# Altium schematic symbol library MY_LIB_Semiconductors.SchLib: 50 symbols
Pins are listed as number, name and electrical type; pins without a type are passive.

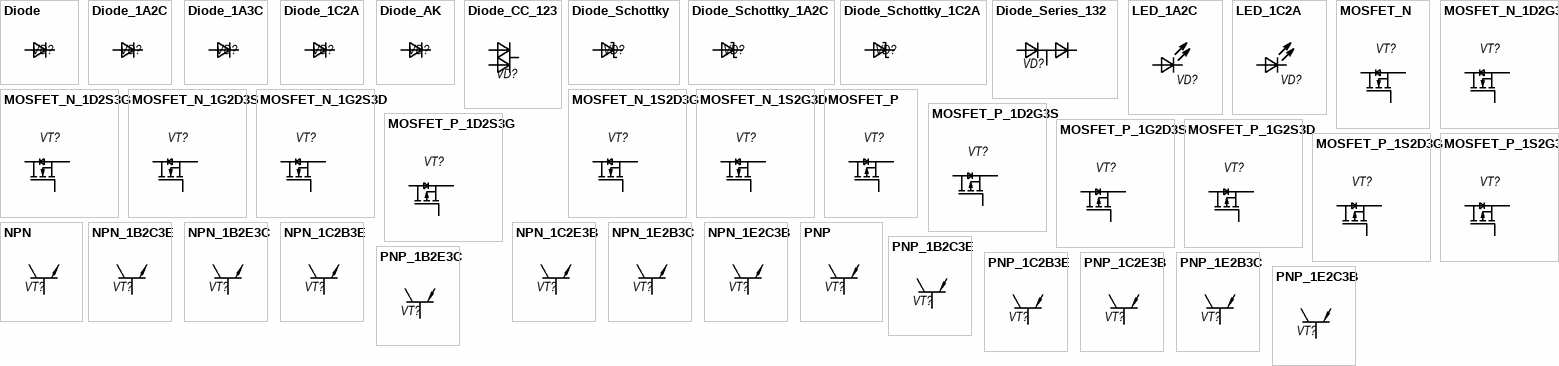
[diagram p0: symbols Diode to PNP_1E2C3B]

## Diode
designator VD?  (value not drawn)
Generic Diode; manually redrawn to DBUR default-view dimensions; horizontal
pins: 1 A, 2 C

## Diode_1A2C
designator VD?  (value not drawn)
Generic Diode; pin mapping 1A2C; geometry preserved from Diode
pins: 1 A, 2 C

## Diode_1A3C
designator VD?  (value not drawn)
Diode; part1: A=1,C=3
pins: 1 A, 3 C

## Diode_1C2A
designator VD?  (value not drawn)
Generic Diode; pin mapping 1C2A; geometry preserved from Diode
pins: 1 C, 2 A

## Diode_AK
designator VD?  (value not drawn)
Diode; part1: A=A,C=K
pins: A, K C

## Diode_CC_123
designator VD?  (value not drawn)
Two Diode junctions; compact touching contours per GOST 2.730-73 table 5 items 8/8a; CC; pins 1,2,3
pins: 1 A1, 2 A2, 3 C

## Diode_Schottky
designator VD?  (value not drawn)
Generic Diode_Schottky; manually redrawn to DBUR default-view dimensions; horizontal
pins: 1 A, 2 C

## Diode_Schottky_1A2C
designator VD?  (value not drawn)
Generic Diode_Schottky; pin mapping 1A2C; geometry preserved from Diode_Schottky
pins: 1 A, 2 C

## Diode_Schottky_1C2A
designator VD?  (value not drawn)
Generic Diode_Schottky; pin mapping 1C2A; geometry preserved from Diode_Schottky
pins: 1 C, 2 A

## Diode_Series_132
designator VD?  (value not drawn)
Diode; two junctions in one symbol; SERIES; physical pins 1,2,3
pins: 1 A1, 2 C2, 3 C1/A2

## LED_1A2C
designator VD?, comment LED  (value not drawn)
Generic LED; manually redrawn to DBUR default-view dimensions; horizontal
pins: 1 A, 2 C

## LED_1C2A
designator VD?, comment LED  (value not drawn)
Generic LED; manually redrawn to DBUR default-view dimensions; horizontal
pins: 1 C, 2 A

## MOSFET_N
designator VT?  (value not drawn)
Generic MOSFET_N; manually redrawn to DBUR default-view dimensions; horizontal
pins: 1 Gate, 2 Drain, 3 Source

## MOSFET_N_1D2G3S
designator VT?  (value not drawn)
Generic MOSFET_N; pin mapping 1D2G3S; geometry preserved from MOSFET_N
pins: 1 Drain, 2 Gate, 3 Source

## MOSFET_N_1D2S3G
designator VT?  (value not drawn)
Generic MOSFET_N; pin mapping 1D2S3G; geometry preserved from MOSFET_N
pins: 1 Drain, 2 Source, 3 Gate

## MOSFET_N_1G2D3S
designator VT?  (value not drawn)
Generic MOSFET_N; pin mapping 1G2D3S; geometry preserved from MOSFET_N
pins: 1 Gate, 2 Drain, 3 Source

## MOSFET_N_1G2S3D
designator VT?  (value not drawn)
Generic MOSFET_N; pin mapping 1G2S3D; geometry preserved from MOSFET_N
pins: 1 Gate, 2 Source, 3 Drain

## MOSFET_N_1S2D3G
designator VT?  (value not drawn)
Generic MOSFET_N; pin mapping 1S2D3G; geometry preserved from MOSFET_N
pins: 1 Source, 2 Drain, 3 Gate

## MOSFET_N_1S2G3D
designator VT?  (value not drawn)
Generic MOSFET_N; pin mapping 1S2G3D; geometry preserved from MOSFET_N
pins: 1 Source, 2 Gate, 3 Drain

## MOSFET_P
designator VT?  (value not drawn)
Generic MOSFET_P; manually redrawn to DBUR default-view dimensions; horizontal
pins: 1 GATE, 2 DRAIN, 3 SOURCE

## MOSFET_P_1D2G3S
designator VT?  (value not drawn)
Generic MOSFET_P; pin mapping 1D2G3S; geometry preserved from MOSFET_P
pins: 1 DRAIN, 2 GATE, 3 SOURCE

## MOSFET_P_1D2S3G
designator VT?  (value not drawn)
Generic MOSFET_P; pin mapping 1D2S3G; geometry preserved from MOSFET_P
pins: 1 DRAIN, 2 SOURCE, 3 GATE

## MOSFET_P_1G2D3S
designator VT?  (value not drawn)
Generic MOSFET_P; pin mapping 1G2D3S; geometry preserved from MOSFET_P
pins: 1 GATE, 2 DRAIN, 3 SOURCE

## MOSFET_P_1G2S3D
designator VT?  (value not drawn)
Generic MOSFET_P; pin mapping 1G2S3D; geometry preserved from MOSFET_P
pins: 1 GATE, 2 SOURCE, 3 DRAIN

## MOSFET_P_1S2D3G
designator VT?  (value not drawn)
Generic MOSFET_P; pin mapping 1S2D3G; geometry preserved from MOSFET_P
pins: 1 SOURCE, 2 DRAIN, 3 GATE

## MOSFET_P_1S2G3D
designator VT?  (value not drawn)
Generic MOSFET_P; pin mapping 1S2G3D; geometry preserved from MOSFET_P
pins: 1 SOURCE, 2 GATE, 3 DRAIN

## NPN
designator VT?  (value not drawn)
Generic NPN; manually redrawn to DBUR default-view dimensions; horizontal
pins: 1 Base, 2 EMITTER, 3 COLLECTOR

## NPN_1B2C3E
designator VT?  (value not drawn)
Generic NPN; pin mapping 1B2C3E; geometry preserved from NPN
pins: 1 Base, 2 COLLECTOR, 3 EMITTER

## NPN_1B2E3C
designator VT?  (value not drawn)
Generic NPN; pin mapping 1B2E3C; geometry preserved from NPN
pins: 1 Base, 2 EMITTER, 3 COLLECTOR

## NPN_1C2B3E
designator VT?  (value not drawn)
Generic NPN; pin mapping 1C2B3E; geometry preserved from NPN
pins: 1 COLLECTOR, 2 Base, 3 EMITTER

## NPN_1C2E3B
designator VT?  (value not drawn)
Generic NPN; pin mapping 1C2E3B; geometry preserved from NPN
pins: 1 COLLECTOR, 2 EMITTER, 3 Base

## NPN_1E2B3C
designator VT?  (value not drawn)
Generic NPN; pin mapping 1E2B3C; geometry preserved from NPN
pins: 1 EMITTER, 2 Base, 3 COLLECTOR

## NPN_1E2C3B
designator VT?  (value not drawn)
Generic NPN; pin mapping 1E2C3B; geometry preserved from NPN
pins: 1 EMITTER, 2 COLLECTOR, 3 Base

## PNP
designator VT?  (value not drawn)
Generic PNP; manually redrawn to DBUR default-view dimensions; horizontal
pins: 1 База, 2 Эмиттер, 3 Коллектор

## PNP_1B2C3E
designator VT?  (value not drawn)
Generic PNP; pin mapping 1B2C3E; geometry preserved from PNP
pins: 1 База, 2 Коллектор, 3 Эмиттер

## PNP_1B2E3C
designator VT?  (value not drawn)
Generic PNP; pin mapping 1B2E3C; geometry preserved from PNP
pins: 1 База, 2 Эмиттер, 3 Коллектор

## PNP_1C2B3E
designator VT?  (value not drawn)
Generic PNP; pin mapping 1C2B3E; geometry preserved from PNP
pins: 1 Коллектор, 2 База, 3 Эмиттер

## PNP_1C2E3B
designator VT?  (value not drawn)
Generic PNP; pin mapping 1C2E3B; geometry preserved from PNP
pins: 1 Коллектор, 2 Эмиттер, 3 База

## PNP_1E2B3C
designator VT?  (value not drawn)
Generic PNP; pin mapping 1E2B3C; geometry preserved from PNP
pins: 1 Эмиттер, 2 База, 3 Коллектор

## PNP_1E2C3B
designator VT?  (value not drawn)
Generic PNP; pin mapping 1E2C3B; geometry preserved from PNP
pins: 1 Эмиттер, 2 Коллектор, 3 База

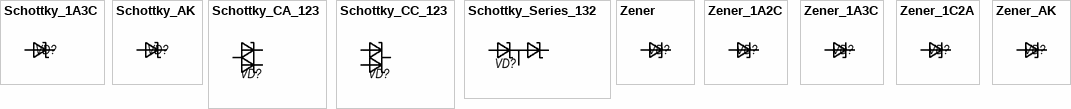
[diagram p1: symbols Schottky_1A3C to Zener_AK]

## Schottky_1A3C
designator VD?  (value not drawn)
Diode_Schottky; part1: A=1,C=3
pins: 1 A, 3 C

## Schottky_AK
designator VD?  (value not drawn)
Diode_Schottky; part1: A=A,C=K
pins: A, K C

## Schottky_CA_123
designator VD?  (value not drawn)
Two Diode_Schottky junctions; compact touching contours per GOST 2.730-73 table 5 items 8/8a; CA; pins 1,2,3
pins: 1 C1, 2 C2, 3 A

## Schottky_CC_123
designator VD?  (value not drawn)
Two Diode_Schottky junctions; compact touching contours per GOST 2.730-73 table 5 items 8/8a; CC; pins 1,2,3
pins: 1 A1, 2 A2, 3 C

## Schottky_Series_132
designator VD?  (value not drawn)
Diode_Schottky; two junctions in one symbol; SERIES; physical pins 1,2,3
pins: 1 A1, 2 C2, 3 C1/A2

## Zener
designator VD?  (value not drawn)
Generic Zener; manually redrawn to DBUR default-view dimensions; horizontal
pins: 1 A, 2 C

## Zener_1A2C
designator VD?  (value not drawn)
Generic Zener; pin mapping 1A2C; geometry preserved from Zener
pins: 1 A, 2 C

## Zener_1A3C
designator VD?  (value not drawn)
Zener; part1: A=1,C=3
pins: 1 A, 3 C

## Zener_1C2A
designator VD?  (value not drawn)
Generic Zener; pin mapping 1C2A; geometry preserved from Zener
pins: 1 C, 2 A

## Zener_AK
designator VD?  (value not drawn)
Zener; part1: A=A,C=K
pins: A, K C